# Altium footprint library SamacSys.PcbLib: 1008 footprints (part 17 of 63)
Each footprint in its own frame and in the unit in brackets; x right, y up, seen from the top. Pads: shape width x height; smd on the part's side, far side on the other; paste and mask are expansions set on the pad; w line width, h text height; cw(c..) or ccw(c..) is an arc to the next point about the centre after c.
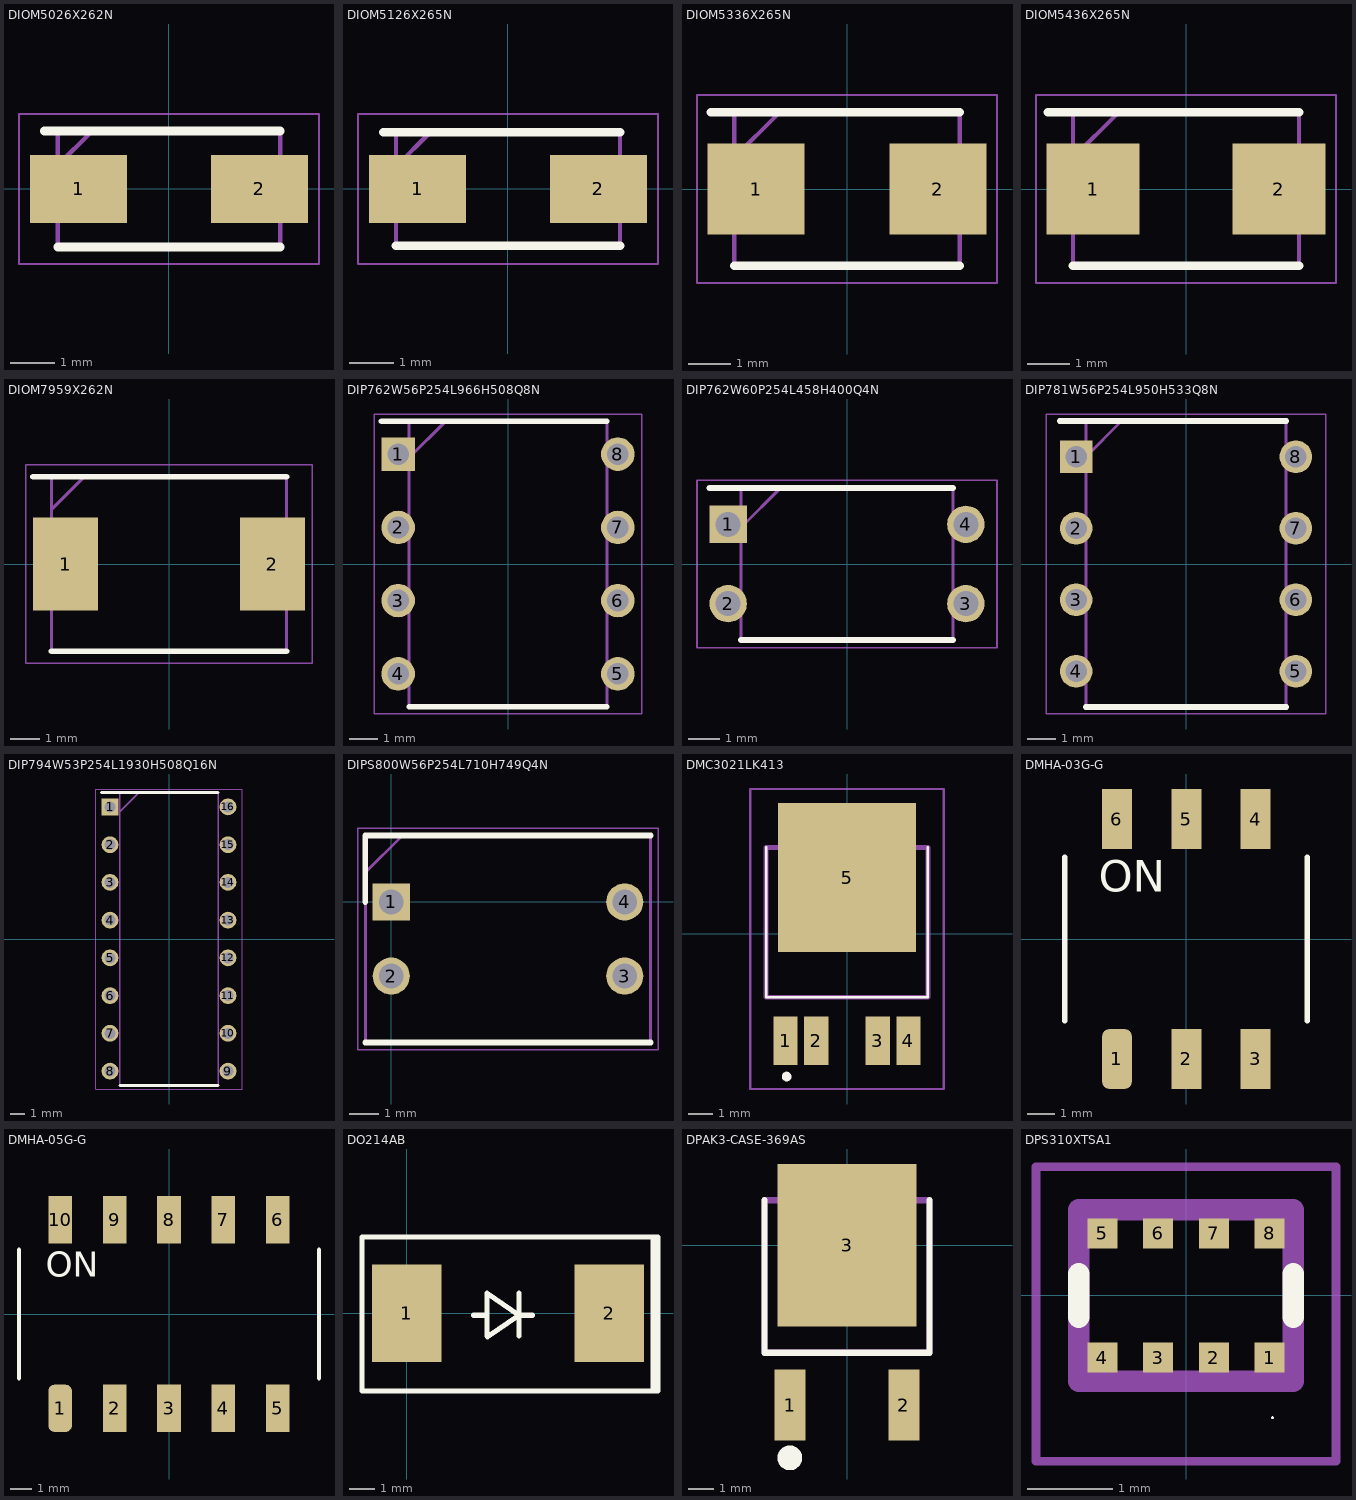
[diagram p16: the footprints below, top view; thin cyan lines are the x and y axes]

## DIOM5026X262N [mm]
pads (2):
  rect 2.2x1.55 smd: 1(-2.05,0) 2(2.05,0)
Top Overlay:
  lines w0.2: -2.825,1.312 2.52,1.312 ; -2.52,-1.312 2.52,-1.312
Assembly:
  lines w0.1: -2.52,0.538 -1.745,1.312 ; -2.52,-1.312 -2.52,1.312 2.52,1.312 2.52,-1.312 -2.52,-1.312
Countryard:
  lines w0.05: -3.4,-1.7 -3.4,1.7 3.4,1.7 3.4,-1.7 -3.4,-1.7
3D body "SS310A.stp": height 2.62, standoff 0, extent -2.52,-1.312 2.52,1.312

## DIOM5126X265N [mm]
pads (2):
  rect 2.2x1.55 smd: 1(-2.05,0) 2(2.05,0)
Top Overlay:
  lines w0.2: -2.825,1.288 2.538,1.288 ; -2.538,-1.288 2.538,-1.288
Assembly:
  lines w0.1: -2.538,0.512 -1.762,1.288 ; -2.538,-1.288 -2.538,1.288 2.538,1.288 2.538,-1.288 -2.538,-1.288
Countryard:
  lines w0.05: -3.4,-1.7 -3.4,1.7 3.4,1.7 3.4,-1.7 -3.4,-1.7
3D body "STPS1H100A.stp": height 2.65, standoff 0, extent -2.538,-1.288 2.538,1.288

## DIOM5336X265N [mm]
pads (2):
  rect 2.3x2.15 smd: 1(-2.15,0) 2(2.15,0)
Top Overlay:
  lines w0.2: -3.225,1.812 2.67,1.812 ; -2.67,-1.812 2.67,-1.812
Assembly:
  lines w0.1: -2.67,0.738 -1.595,1.812 ; -2.67,-1.812 2.67,-1.812 2.67,1.812 -2.67,1.812 -2.67,-1.812
Countryard:
  lines w0.05: -3.55,-2.225 3.55,-2.225 3.55,2.225 -3.55,2.225 -3.55,-2.225
3D body "S2M.stp": height 2.65, standoff 0, extent -2.67,-1.813 2.67,1.813

## DIOM5436X265N [mm]
pads (2):
  rect 2.2x2.15 smd: 1(-2.2,0) 2(2.2,0)
Top Overlay:
  lines w0.2: -3.275,1.812 2.675,1.812 ; -2.675,-1.812 2.675,-1.812
Assembly:
  lines w0.1: -2.675,0.738 -1.6,1.812 ; -2.675,-1.812 2.675,-1.812 2.675,1.812 -2.675,1.812 -2.675,-1.812
Countryard:
  lines w0.05: -3.55,-2.225 3.55,-2.225 3.55,2.225 -3.55,2.225 -3.55,-2.225
3D body "SM6T30A.stp": height 2.33, standoff 0.01, extent -2.675,-1.86 2.675,1.86

## DIOM7959X262N [mm]
pads (2):
  rect 2.2x3.15 smd: 1(-3.5,0) 2(3.5,0)
Top Overlay:
  lines w0.2: -4.6,2.952 3.97,2.952 ; -3.97,-2.952 3.97,-2.952
Assembly:
  lines w0.1: -3.97,1.852 -2.87,2.952 ; -3.97,-2.952 -3.97,2.952 3.97,2.952 3.97,-2.952 -3.97,-2.952
Countryard:
  lines w0.05: -4.85,-3.36 -4.85,3.36 4.85,3.36 4.85,-3.36 -4.85,-3.36
3D body "SSC54-E3_9AT.stp": height 2.62, standoff 0, extent -3.97,-2.953 3.97,2.953

## DIP762W56P254L966H508Q8N [mm]
pads (8):
  rect 1.16x1.16 hole 0.76: 1(-3.81,3.81)
  round 1.16 hole 0.76: 2(-3.81,1.27) 3(-3.81,-1.27) 4(-3.81,-3.81) 5(3.81,-3.81) 6(3.81,-1.27) 7(3.81,1.27) 8(3.81,3.81)
Top Overlay:
  lines w0.2: -4.39,4.955 3.43,4.955 ; -3.43,-4.955 3.43,-4.955
Assembly:
  lines w0.1: -3.43,3.685 -2.16,4.955 ; -3.43,-4.955 -3.43,4.955 3.43,4.955 3.43,-4.955 -3.43,-4.955
Countryard:
  lines w0.05: -4.64,-5.205 -4.64,5.205 4.64,5.205 4.64,-5.205 -4.64,-5.205
3D body "6N137M.stp": height 5.08, standoff -3.5, extent -3.95,-4.828 3.95,4.828

## DIP762W60P254L458H400Q4N [mm]
pads (4):
  rect 1.2x1.2 hole 0.8: 1(-3.81,1.27)
  round 1.2 hole 0.8: 2(-3.81,-1.27) 3(3.81,-1.27) 4(3.81,1.27)
Top Overlay:
  lines w0.2: -4.41,2.44 3.4,2.44 ; -3.4,-2.44 3.4,-2.44
Assembly:
  lines w0.1: -3.4,1.17 -2.13,2.44 ; -3.4,-2.44 3.4,-2.44 3.4,2.44 -3.4,2.44 -3.4,-2.44
Countryard:
  lines w0.05: -4.81,-2.69 4.81,-2.69 4.81,2.69 -4.81,2.69 -4.81,-2.69
3D body "PC817X2NSZ0F.stp": height 4, standoff -3.5, extent -3.96,-2.29 3.96,2.29

## DIP781W56P254L950H533Q8N [mm]
pads (8):
  rect 1.16x1.16 hole 0.76: 1(-3.905,3.81)
  round 1.16 hole 0.76: 2(-3.905,1.27) 3(-3.905,-1.27) 4(-3.905,-3.81) 5(3.905,-3.81) 6(3.905,-1.27) 7(3.905,1.27) 8(3.905,3.81)
Top Overlay:
  lines w0.2: -4.485,5.08 3.556,5.08 ; -3.556,-5.08 3.556,-5.08
Assembly:
  lines w0.1: -3.556,3.81 -2.286,5.08 ; -3.556,-5.08 -3.556,5.08 3.556,5.08 3.556,-5.08 -3.556,-5.08
Countryard:
  lines w0.05: -4.958,-5.33 -4.958,5.33 4.958,5.33 4.958,-5.33 -4.958,-5.33
3D body "24LC512-I_P.stp": height 5.33, standoff -3.5, extent -4.045,-4.75 4.045,4.75

## DIP794W53P254L1930H508Q16N [mm]
pads (16):
  rect 1.13x1.13 hole 0.73: 1(-3.97,8.89)
  round 1.13 hole 0.73: 2(-3.97,6.35) 3(-3.97,3.81) 4(-3.97,1.27) 5(-3.97,-1.27) 6(-3.97,-3.81) 7(-3.97,-6.35) 8(-3.97,-8.89) 9(3.97,-8.89) 10(3.97,-6.35) 11(3.97,-3.81) 12(3.97,-1.27) 13(3.97,1.27) 14(3.97,3.81) 15(3.97,6.35) 16(3.97,8.89)
Top Overlay:
  lines w0.2: -4.535,9.845 3.3,9.845 ; -3.3,-9.845 3.3,-9.845
Assembly:
  lines w0.1: -3.3,8.575 -2.03,9.845 ; -3.3,-9.845 -3.3,9.845 3.3,9.845 3.3,-9.845 -3.3,-9.845
Countryard:
  lines w0.05: -4.945,-10.095 -4.945,10.095 4.945,10.095 4.945,-10.095 -4.945,-10.095
3D body "CD4094BE.stp": height 5.27, standoff -3.1, extent -3.937,-9.842 3.937,9.842

## DIPS800W56P254L710H749Q4N [mm]
pads (4):
  rect 1.275x1.275 hole 0.85: 1(0,0)
  round 1.275 hole 0.85: 2(0,-2.54) 3(8,-2.54) 4(8,0)
Top Overlay:
  lines w0.2: -0.89,-4.82 8.89,-4.82 ; -0.89,0 -0.89,2.28 8.89,2.28
Assembly:
  lines w0.1: -0.89,1.01 0.38,2.28 ; -0.89,-4.82 -0.89,2.28 8.89,2.28 8.89,-4.82 -0.89,-4.82
Countryard:
  lines w0.05: -1.14,-5.07 -1.14,2.53 9.14,2.53 9.14,-5.07 -1.14,-5.07

## DMC3021LK413 [mm]
pads (5):
  rect 1x2 smd: 1(-2.54,-4.415) 2(-1.27,-4.415) 3(1.27,-4.415) 4(2.54,-4.415)
  rect 5.73x6.17 smd: 5(0,2.33)
Top Overlay:
  lines w0.1: -3.35,3.585 -3.35,-2.615 3.35,-2.615 3.35,3.585
  lines w0.2: -2.6,-5.9 cw(c-2.5,-5.9) -2.4,-5.9 cw(c-2.5,-5.9) -2.6,-5.9
Assembly:
  lines w0.2: -3.35,-2.615 -3.35,3.585 3.35,3.585 3.35,-2.615 -3.35,-2.615
Countryard:
  lines w0.1: -4,-6.415 -4,6 4,6 4,-6.415 -4,-6.415
3D body "User Library-TO252-4L.STEP": height 2.3, standoff -0.01, extent -3.22,-4.7 3.28,5.1

## DMHA-03G-G [mm]
pads (6):
  rrect50% 1.1x2.2 smd: 1(-2.54,-4.4)
  rect 1.1x2.2 smd: 2(0,-4.4) 3(2.54,-4.4) 4(2.54,4.4) 5(0,4.4) 6(-2.54,4.4)
Top Overlay:
  lines w0.2: -4.46,-3 -4.46,3 ; 4.44,-3 4.44,3
  text "ON" at -3.206,1.348 h2
3D body "SMD DIP SWITCH 3P.step": height 4.36, standoff 0.04, extent -4.28,-4.9 4.28,4.9

## DMHA-05G-G [mm]
pads (10):
  rrect50% 1.1x2.2 smd: 1(-5.08,-4.4)
  rect 1.1x2.2 smd: 2(-2.54,-4.4) 3(0,-4.4) 4(2.54,-4.4) 5(5.08,-4.4) 6(5.08,4.4) 7(2.54,4.4) 8(0,4.4) 9(-2.54,4.4) 10(-5.08,4.4)
Top Overlay:
  lines w0.2: -7,-3 -7,3 ; 7,-3 7,3
  text "ON" at -5.746,1.348 h2
3D body "SMD DIP SWITCH 5P.step": height 4.36, standoff 0.04, extent -6.82,-4.9 6.82,4.9

## DO214AB [mm]
pads (2):
  rect 2.75x3.85 smd: 1(0,0) 2(8.025,0)
Top Overlay:
  lines w0.2: -1.775,-0.15 -1.775,3.025 9.95,3.025 9.95,-3.075 -1.775,-3.075 -1.775,-0.05 ; 2.65,-0.075 3.175,-0.075 ; 3.175,-0.9 3.175,0.8 4.45,-0.075 ; 3.2,-0.925 4.45,-0.075 ; 4.45,-0.9 4.45,0.8 ; 4.975,-0.075 4.45,-0.075 ; 9.75,-3.05 9.75,3.025
3D body "DO-214AB.STEP": height 2.94, standoff 0.01, extent -0.025,-3.15 8.025,3.1

## DPAK3-CASE-369AS [mm]
pads (3):
  rect 1.25x2.85 smd: 1(-2.28,-6.4) 2(2.28,-6.4)
  rect 5.55x6.5 smd: 3(0,0)
Top Overlay:
  circle w0.5: c-2.291,-8.514 r0.245
  lines w0.254: -3.3,1.8 -3.3,-4.3 3.3,-4.3 3.3,1.8
Assembly:
  lines w0.254: -3.3,-4.3 -3.3,1.8 3.3,1.8 3.3,-4.3 -3.3,-4.3
3D body "FDD6637.stp": height 2.42, standoff -0.1, extent -3.345,-7.39 3.385,3.02

## DPS310XTSA1 [mm]
pads (8):
  rect 0.35x0.35 smd: 1(0.975,-0.725) 2(0.325,-0.725) 3(-0.325,-0.725) 4(-0.975,-0.725) 5(-0.975,0.725) 6(-0.325,0.725) 7(0.325,0.725) 8(0.975,0.725)
Top Overlay:
  lines w0.016: 1.001,-1.424 ccw(c1.009,-1.424) 1.017,-1.424 ccw(c1.009,-1.424) 1.001,-1.424
  lines w0.254: -1.25,-0.25 -1.25,0.25 ; 1.25,-0.25 1.25,0.25
Assembly:
  lines w0.254: -1.25,-1 1.25,-1 1.25,1 -1.25,1 -1.25,-1
Countryard:
  lines w0.1: -1.75,-1.932 1.75,-1.932 1.75,1.5 -1.75,1.5 -1.75,-1.932
3D body "DPS310XTSA1.stp": height 1, standoff 0, extent -1.25,-1 1.25,1